# Altium schematic symbol library NXE2S0505MC-R13.SchLib: 1 symbol
Pins are listed as number, name and electrical type; pins without a type are passive.

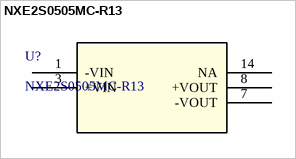
[diagram p0: symbol NXE2S0505MC-R13]

## NXE2S0505MC-R13
designator U?
Description; Manufacturer_Name: Murata; Copyright: Copyright (C) 2026 Ultra Librarian. All rights reserved.; Manufacturer_Part_Number: NXE2S0505MC-R13; RefDes: RefDes; Type: Type
footprint NXE2S0505MC-R13_MUR
pins: 1 -VIN, 3 +VIN, 7 -VOUT, 8 +VOUT, 14 NA